# Altium footprint library MY_LIB_Inductors.PcbLib: 2 footprints
Each footprint in its own frame and in the unit in brackets; x right, y up, seen from the top. Pads: shape width x height; smd on the part's side, far side on the other; paste and mask are expansions set on the pad; w line width, h text height; cw(c..) or ccw(c..) is an arc to the next point about the centre after c.
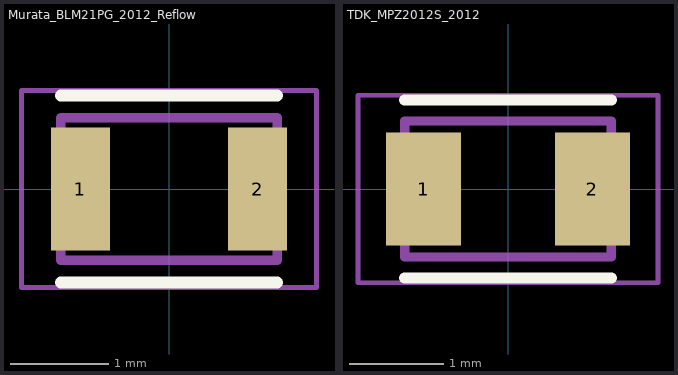
[diagram p0: the footprints below, top view; thin cyan lines are the x and y axes]

## Murata_BLM21PG_2012_Reflow [mm] "Murata BLM21PG; reflow land pattern 0.6x1.25mm gap1.2mm; check current-dependent feed copper in ENFA0005 section12.1"
height 1.05
pads (2):
  rect 0.6x1.25 smd paste+0 mask+0.05: 1(-0.9,0) 2(0.9,0)
Top Overlay:
  lines w0.12: -1.1,-0.95 1.1,-0.95 ; -1.1,0.95 1.1,0.95
Top Assembly:
  lines w0.1: -1.1,-0.725 1.1,-0.725 1.1,0.725 -1.1,0.725 -1.1,-0.725
Top Courtyard:
  lines w0.05: -1.5,-1 1.5,-1 1.5,1 -1.5,1 -1.5,-1
3D body "IND_BLM21_MUR.step": height 1.05, standoff 0, extent -1.105,-0.725 1.105,0.725

## TDK_MPZ2012S_2012 [mm] "TDK MPZ2012S; reflow land pattern 0.8x1.2mm gap1.0mm; UL STEP height1.10mm (datasheet max1.05mm)"
height 1.1
pads (2):
  rect 0.8x1.2 smd paste+0 mask+0.05: 1(-0.9,0) 2(0.9,0)
Top Overlay:
  lines w0.12: -1.1,-0.95 1.1,-0.95 ; -1.1,0.95 1.1,0.95
Top Assembly:
  lines w0.1: -1.1,-0.725 1.1,-0.725 1.1,0.725 -1.1,0.725 -1.1,-0.725
Top Courtyard:
  lines w0.05: -1.6,-1 1.6,-1 1.6,1 -1.6,1 -1.6,-1
3D body "IND_2012_TDK.step": height 1.1, standoff 0, extent -1.1,-0.725 1.1,0.725